# Altium footprint library PCB4_PcbLib.PcbLib: 18 footprints (part 1 of 2)
Each footprint in its own frame and in the unit in brackets; x right, y up, seen from the top. Pads: shape width x height; smd on the part's side, far side on the other; paste and mask are expansions set on the pad; w line width, h text height; cw(c..) or ccw(c..) is an arc to the next point about the centre after c.
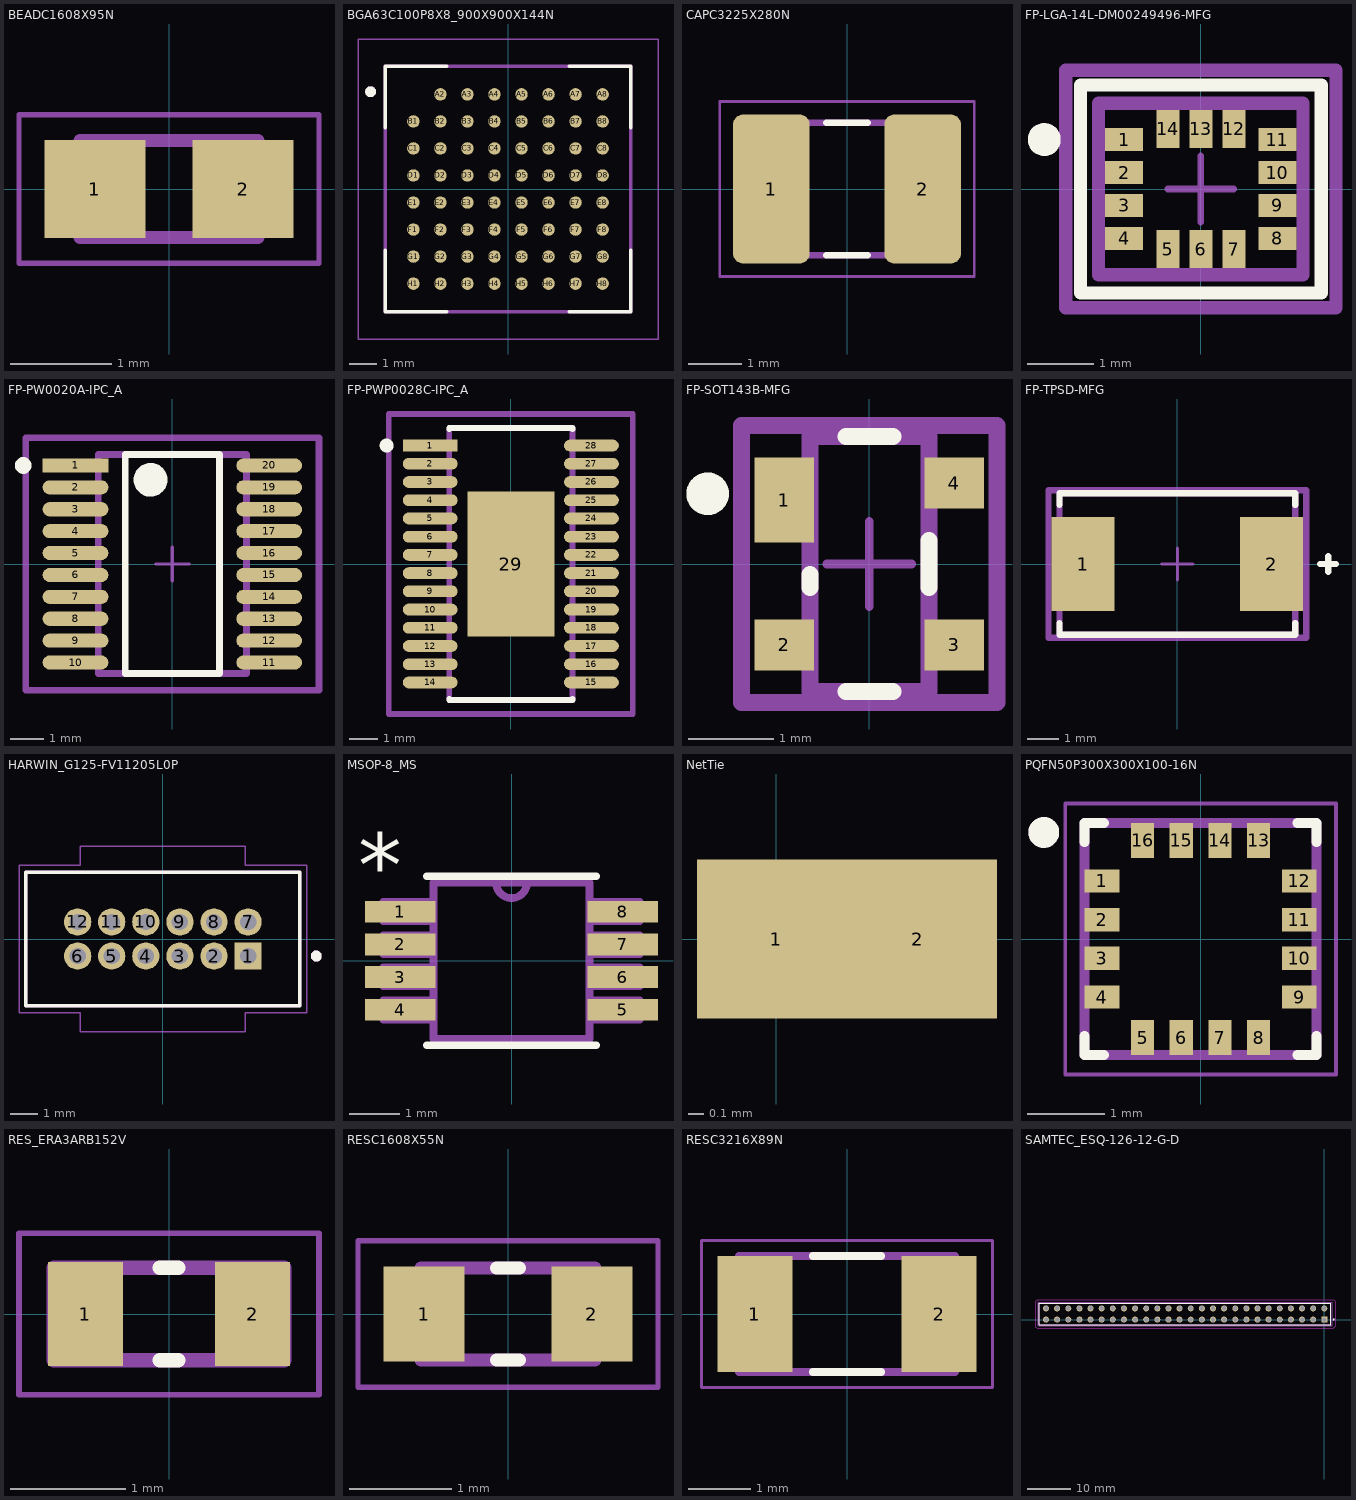
[diagram p0: the footprints below, top view; thin cyan lines are the x and y axes]

## BEADC1608X95N [mm]
pads (2):
  rect 1x0.97 smd: 1(-0.735,0) 2(0.735,0)
Mechanical 13:
  lines w0.127: -0.88,-0.48 -0.88,0.48 0.88,0.48 0.88,-0.48 -0.88,-0.48
Mechanical 15:
  lines w0.05: -1.485,-0.735 -1.485,0.735 1.485,0.735 1.485,-0.735 -1.485,-0.735

## BGA63C100P8X8_900X900X144N [mm]
pads (63):
  round 0.46 smd paste+0 mask+0.102: A2(-2.5,3.5) A3(-1.5,3.5) A4(-0.5,3.5) A5(0.5,3.5) A6(1.5,3.5) A7(2.5,3.5) A8(3.5,3.5) B1(-3.5,2.5) B2(-2.5,2.5) B3(-1.5,2.5) B4(-0.5,2.5) B5(0.5,2.5) B6(1.5,2.5) B7(2.5,2.5) B8(3.5,2.5) C1(-3.5,1.5) C2(-2.5,1.5) C3(-1.5,1.5) C4(-0.5,1.5) C5(0.5,1.5) C6(1.5,1.5) C7(2.5,1.5) C8(3.5,1.5) D1(-3.5,0.5) D2(-2.5,0.5) D3(-1.5,0.5) D4(-0.5,0.5) D5(0.5,0.5) D6(1.5,0.5) D7(2.5,0.5) D8(3.5,0.5) E1(-3.5,-0.5) E2(-2.5,-0.5) E3(-1.5,-0.5) E4(-0.5,-0.5) E5(0.5,-0.5) E6(1.5,-0.5) E7(2.5,-0.5) E8(3.5,-0.5) F1(-3.5,-1.5) F2(-2.5,-1.5) F3(-1.5,-1.5) F4(-0.5,-1.5) F5(0.5,-1.5) F6(1.5,-1.5) F7(2.5,-1.5) F8(3.5,-1.5) G1(-3.5,-2.5) G2(-2.5,-2.5) G3(-1.5,-2.5) G4(-0.5,-2.5) G5(0.5,-2.5) G6(1.5,-2.5) G7(2.5,-2.5) G8(3.5,-2.5) H1(-3.5,-3.5) H2(-2.5,-3.5) H3(-1.5,-3.5) H4(-0.5,-3.5) H5(0.5,-3.5) H6(1.5,-3.5) H7(2.5,-3.5) H8(3.5,-3.5)
Top Overlay:
  circle w0.2: c-5.084,3.6 r0.1
  lines w0.127: -4.54,-2.27 -4.54,-4.54 -2.27,-4.54 ; -4.54,2.27 -4.54,4.54 -2.27,4.54 ; 2.27,-4.54 4.54,-4.54 4.54,-2.27 ; 2.27,4.54 4.54,4.54 4.54,2.27
Mechanical 13:
  circle w0.2: c-5.084,3.6 r0.1
  lines w0.127: -4.54,-4.54 4.54,-4.54 4.54,4.54 -4.54,4.54 -4.54,-4.54
Mechanical 15:
  lines w0.05: -5.55,-5.55 5.55,-5.55 5.55,5.55 -5.55,5.55 -5.55,-5.55
3D body "AR0135CS2C00SUEA0-DRBR1.STEP": height 1, standoff 0, extent -4.54,-4.54 4.54,4.54

## CAPC3225X280N [mm]
pads (2):
  rrect25% 1.45x2.81 smd paste+0 mask+0.102: 1(-1.43,0) 2(1.43,0)
Top Overlay:
  lines w0.127: -0.39,-1.25 0.39,-1.25 ; -0.39,1.25 0.39,1.25
Mechanical 13:
  lines w0.127: -1.6,-1.25 -1.6,1.25 1.6,1.25 1.6,-1.25 -1.6,-1.25
Mechanical 15:
  lines w0.05: -2.405,-1.655 -2.405,1.655 2.405,1.655 2.405,-1.655 -2.405,-1.655
3D body "step_temp.STEP": height 2.8, standoff 0, extent -1.6,-1.25 1.6,1.25

## FP-LGA-14L-DM00249496-MFG [mm]
pads (14):
  rect 0.575x0.35 smd paste+0 mask+0.05: 1(-1.162,0.75) 2(-1.162,0.25) 3(-1.162,-0.25) 4(-1.162,-0.75) 8(1.162,-0.75) 9(1.162,-0.25) 10(1.162,0.25) 11(1.162,0.75)
  rect 0.35x0.575 smd paste+0 mask+0.05: 5(-0.5,-0.913) 6(0,-0.913) 7(0.5,-0.913) 12(0.5,0.913) 13(0,0.913) 14(-0.5,0.913)
Top Overlay:
  circle w0.25: c-2.375,0.75 r0.125
  lines w0.2: -1.825,-1.575 -1.825,1.575 1.825,1.575 1.825,-1.575 -1.825,-1.575
Top 3D Body:
  lines w0.2: -1.55,-1.3 -1.55,1.3 1.55,1.3 1.55,-1.3 -1.55,-1.3
Top Courtyard:
  lines w0.2: -2.05,-1.8 -2.05,1.8 2.05,1.8 2.05,-1.8 -2.05,-1.8
Top Assembly:
  lines w0.2: -2.05,-1.8 -2.05,1.8 2.05,1.8 2.05,-1.8 -2.05,-1.8
  text ".Designator" at 0,0.188 h1
Top Component Center:
  lines w0.1: -0.5,0 0.5,0 ; 0,-0.5 0,0.5
3D body "IC_STMicroelectronics_LSM6DSOXTR_eec.STEP": height 0.25, standoff 0, extent -2.05,-1.8 2.05,1.8

## FP-PW0020A-IPC_A [mm]
pads (20):
  rect 1.955x0.421 smd paste+0 mask+0: 1(-2.875,2.925)
  rrect100% 1.955x0.421 smd paste+0 mask+0: 2(-2.875,2.275) 3(-2.875,1.625) 4(-2.875,0.975) 5(-2.875,0.325) 6(-2.875,-0.325) 7(-2.875,-0.975) 8(-2.875,-1.625) 9(-2.875,-2.275) 10(-2.875,-2.925) 11(2.875,-2.925) 12(2.875,-2.275) 13(2.875,-1.625) 14(2.875,-0.975) 15(2.875,-0.325) 16(2.875,0.325) 17(2.875,0.975) 18(2.875,1.625) 19(2.875,2.275) 20(2.875,2.925)
Top Overlay:
  circle w0.5: c-0.648,2.5 r0.25
  circle w0.25: c-4.428,2.925 r0.125
  lines w0.2: -1.398,-3.25 1.398,-3.25 1.398,3.25 -1.398,3.25 -1.398,-3.25
Top 3D Body:
  lines w0.2: -2.2,-3.25 2.2,-3.25 2.2,3.25 -2.2,3.25 -2.2,-3.25
Top Courtyard:
  lines w0.2: -4.353,-3.75 4.353,-3.75 4.353,3.75 -4.353,3.75 -4.353,-3.75
Top Assembly:
  lines w0.2: -4.353,-3.75 4.353,-3.75 4.353,3.75 -4.353,3.75 -4.353,-3.75
  text ".Designator" at 0,0.188 h1
Top Component Center:
  lines w0.1: -0.5,0 0.5,0 ; 0,-0.5 0,0.5
3D body "IC_Texas_Instruments_CDCE906PW_eec.STEP": height 0.25, standoff 0, extent -4.353,-3.75 4.353,3.75

## FP-PWP0028C-IPC_A [mm]
pads (29):
  rect 1.955x0.421 smd paste+0 mask+0: 1(-2.875,4.225)
  rrect100% 1.955x0.421 smd paste+0 mask+0: 2(-2.875,3.575) 3(-2.875,2.925) 4(-2.875,2.275) 5(-2.875,1.625) 6(-2.875,0.975) 7(-2.875,0.325) 8(-2.875,-0.325) 9(-2.875,-0.975) 10(-2.875,-1.625) 11(-2.875,-2.275) 12(-2.875,-2.925) 13(-2.875,-3.575) 14(-2.875,-4.225) 15(2.875,-4.225) 16(2.875,-3.575) 17(2.875,-2.925) 18(2.875,-2.275) 19(2.875,-1.625) 20(2.875,-0.975) 21(2.875,-0.325) 22(2.875,0.325) 23(2.875,0.975) 24(2.875,1.625) 25(2.875,2.275) 26(2.875,2.925) 27(2.875,3.575) 28(2.875,4.225)
  rect 3.1x5.18 smd paste-1000 mask+0: 29(0,0)
Top Overlay:
  circle w0.25: c-4.428,4.225 r0.125
  lines w0.2: -2.2,-4.81 -2.2,-4.85 2.2,-4.85 2.2,-4.81 ; -2.2,4.81 -2.2,4.85 2.2,4.85 2.2,4.81
Top Paste:
  rectangle: -1.033,-2.073 1.033,-0.258
  rectangle: -1.033,0.258 1.033,2.073
Top 3D Body:
  lines w0.2: -2.2,-4.85 -2.2,4.85 2.2,4.85 2.2,-4.85 -2.2,-4.85
Top Courtyard:
  lines w0.2: -4.353,-5.35 -4.353,5.35 4.353,5.35 4.353,-5.35 -4.353,-5.35
Top Assembly:
  lines w0.2: -4.353,-5.35 -4.353,5.35 4.353,5.35 4.353,-5.35 -4.353,-5.35
  text ".Designator" at 0,0.188 h1
Top Component Center:
  lines w0.1: -0.5,0 0.5,0 ; 0,-0.5 0,0.5
3D body "IC_Texas_Instruments_DRV8880PWPR_eec.STEP": height 0.25, standoff 0, extent -4.353,-5.35 4.353,5.35

## FP-SOT143B-MFG [mm]
pads (4):
  rect 0.7x1 smd paste-1000 mask+0: 1(-1,0.75)
  rect 0.7x0.6 smd paste-1000 mask+0: 2(-1,-0.95) 3(1,-0.95) 4(1,0.95)
Top Overlay:
  circle w0.25: c-1.9,0.825 r0.125
  lines w0.2: -0.7,-0.275 -0.7,-0.125 ; -0.275,-1.5 0.275,-1.5 ; -0.275,1.5 0.275,1.5 ; 0.7,-0.275 0.7,0.275
Top Paste:
  rectangle: -1.3,0.3 -0.7,1.2
  rectangle: -1.3,-1.2 -0.7,-0.7
  rectangle: 0.7,-1.2 1.3,-0.7
  rectangle: 0.7,0.7 1.3,1.2
Top 3D Body:
  lines w0.2: -0.7,-1.5 0.7,-1.5 0.7,1.5 -0.7,1.5 -0.7,-1.5
Top Courtyard:
  lines w0.2: -1.5,-1.625 1.5,-1.625 1.5,1.625 -1.5,1.625 -1.5,-1.625
Top Assembly:
  lines w0.2: -1.5,-1.625 1.5,-1.625 1.5,1.625 -1.5,1.625 -1.5,-1.625
  text ".Designator" at 0,0.188 h1
Top Component Center:
  lines w0.1: -0.5,0 0.5,0 ; 0,-0.5 0,0.5
3D body "Trans_Nexperia_BCM62B_215_eec.STEP": height 0.25, standoff 0, extent -1.5,-1.625 1.5,1.625

## FP-TPSD-MFG [mm]
pads (2):
  rect 2x3 smd paste+0 mask+0: 1(-3,0) 2(3,0)
Top Overlay:
  lines w0.2: -3.75,-1.875 -3.75,-2.25 3.75,-2.25 3.75,-1.875 ; -3.75,1.875 -3.75,2.25 3.75,2.25 3.75,1.875 ; 4.55,0 5.05,0 ; 4.8,-0.25 4.8,0.25
Top 3D Body:
  lines w0.2: -3.75,-2.25 -3.75,2.25 3.75,2.25 3.75,-2.25 -3.75,-2.25
Top Courtyard:
  lines w0.2: -4.1,-2.35 -4.1,2.35 4.1,2.35 4.1,-2.35 -4.1,-2.35
Top Assembly:
  lines w0.2: -4.1,-2.35 -4.1,2.35 4.1,2.35 4.1,-2.35 -4.1,-2.35
  text ".Designator" at 0,0 h1
Top Component Center:
  lines w0.1: -0.5,0 0.5,0 ; 0,-0.5 0,0.5
3D body "Cap_AVX_TPSD476K016R0150_eec.STEP": height 0.25, standoff 0, extent -4.1,-2.35 4.1,2.35

## HARWIN_G125-FV11205L0P [mm]
pads (12):
  rect 1x1 / inner round 1 / far side rect 1x1 hole 0.6: 1(3.125,-0.625)
  round 1 hole 0.6: 2(1.875,-0.625) 3(0.625,-0.625) 4(-0.625,-0.625) 5(-1.875,-0.625) 6(-3.125,-0.625) 7(3.125,0.625) 8(1.875,0.625) 9(0.625,0.625) 10(-0.625,0.625) 11(-1.875,0.625) 12(-3.125,0.625)
Top Overlay:
  circle w0.2: c5.625,-0.625 r0.1
  lines w0.127: -5.025,-2.45 5.025,-2.45 5.025,2.45 -5.025,2.45 -5.025,-2.45
Mechanical 13:
  circle w0.2: c5.625,-0.625 r0.1
  lines w0.127: -5.025,-2.45 5.025,-2.45 5.025,2.45 -5.025,2.45 -5.025,-2.45
Mechanical 15:
  lines w0.05: -5.275,-2.7 -5.275,2.7 -3.025,2.7 -3.025,3.4 3.025,3.4 3.025,2.7 5.275,2.7 5.275,-2.7 3.025,-2.7 3.025,-3.4 -3.025,-3.4 -3.025,-2.7 -5.275,-2.7

## MSOP-8_MS [mil]
pads (8):
  rect 55x17 smd: 1(-87,38.39) 2(-87,12.8) 3(-87,-12.8) 4(-87,-38.39) 5(87,-38.39) 6(87,-12.8) 7(87,12.8) 8(87,38.39)
Top Overlay:
  lines w6: -66,-66 66,-66 ; -66,66 66,66
  text "*" at -120,50 h50
Mechanical 13:
  lines w6: -12,61 ccw(c0,61) 12,61 ; -12,61 -61,61 -61,-61 61,-61 61,61 12,61 ; -12,61 12,61 ; -100,-46 -61,-46 -61,-31 -100,-31 -100,-46 ; -100,-20 -61,-20 -61,-5 -100,-5 -100,-20 ; -100,5 -61,5 -61,20 -100,20 -100,5 ; -100,31 -61,31 -61,46 -100,46 -100,31 ; 61,-46 100,-46 100,-31 61,-31 61,-46 ; 61,-20 100,-20 100,-5 61,-5 61,-20 ; 61,5 100,5 100,20 61,20 61,5 ; 61,31 100,31 100,46 61,46 61,31
  text "*" at -69,8 h50

## NetTie [mm]
pads (2):
  rect 1x1 smd: 1(0,0) 2(0.889,0)

## PQFN50P300X300X100-16N [mm]
pads (16):
  rect 0.45x0.3 smd: 1(-1.275,0.75) 2(-1.275,0.25) 3(-1.275,-0.25) 4(-1.275,-0.75) 9(1.275,-0.75) 10(1.275,-0.25) 11(1.275,0.25) 12(1.275,0.75)
  rect 0.3x0.45 smd: 5(-0.75,-1.275) 6(-0.25,-1.275) 7(0.25,-1.275) 8(0.75,-1.275) 13(0.75,1.275) 14(0.25,1.275) 15(-0.25,1.275) 16(-0.75,1.275)
Top Overlay:
  circle w0.2: c-2.028,1.378 r0.1
  lines w0.127: -1.5,-1.25 -1.5,-1.5 -1.25,-1.5 ; -1.5,1.25 -1.5,1.5 -1.25,1.5 ; 1.25,-1.5 1.5,-1.5 1.5,-1.25 ; 1.25,1.5 1.5,1.5 1.5,1.25
Mechanical 13:
  circle w0.2: c-2.028,1.378 r0.1
  lines w0.127: -1.5,-1.5 -1.5,1.5 1.5,1.5 1.5,-1.5 -1.5,-1.5
Mechanical 15:
  lines w0.05: -1.75,-1.75 -1.75,1.75 1.75,1.75 1.75,-1.75 -1.75,-1.75
3D body "step_temp.STEP": height 1, standoff 0, extent -1.5,-1.5 1.5,1.5

## RES_ERA3ARB152V [mm]
height 0.45
pads (2):
  rect 0.65x0.9 smd: 1(-0.725,0) 2(0.725,0)
Top Overlay:
  lines w0.127: -0.08,-0.4 0.08,-0.4 ; -0.08,0.4 0.08,0.4
Mechanical 13:
  lines w0.127: -1,-0.4 -1,0.4 1,0.4 1,-0.4 -1,-0.4
Mechanical 15:
  lines w0.05: -1.3,-0.7 -1.3,0.7 1.3,0.7 1.3,-0.7 -1.3,-0.7
3D body "step_temp.STEP": height 0.45, standoff 0, extent -0.8,-0.4 0.8,0.4

## RESC1608X55N [mm]
pads (2):
  rect 0.79x0.93 smd paste+0 mask+0.102: 1(-0.82,0) 2(0.82,0)
Top Overlay:
  lines w0.127: -0.11,-0.45 0.11,-0.45 ; -0.11,0.45 0.11,0.45
Mechanical 13:
  lines w0.127: -0.85,-0.45 -0.85,0.45 0.85,0.45 0.85,-0.45 -0.85,-0.45
Mechanical 15:
  lines w0.05: -1.465,-0.715 -1.465,0.715 1.465,0.715 1.465,-0.715 -1.465,-0.715
3D body "step_temp.STEP": height 0.55, standoff 0, extent -0.8,-0.4 0.8,0.4

## RESC3216X89N [mm]
pads (2):
  rect 1.21x1.86 smd paste+0 mask+0.102: 1(-1.476,0) 2(1.476,0)
Top Overlay:
  lines w0.127: -0.55,-0.93 0.55,-0.93 ; -0.55,0.93 0.55,0.93
Mechanical 13:
  lines w0.127: -1.73,-0.93 1.73,-0.93 1.73,0.93 -1.73,0.93 -1.73,-0.93
Mechanical 15:
  lines w0.05: -2.331,-1.181 2.331,-1.181 2.331,1.181 -2.331,1.181 -2.331,-1.181
3D body "step_temp.STEP": height 0.89, standoff 0, extent -1.6,-0.8 1.6,0.8

## SAMTEC_ESQ-126-12-G-D [mm]
pads (52):
  rect 1.37x1.37 hole 1.02: 01(0,0)
  round 1.37 hole 1.02: 02(0,2.54) 03(-2.54,0) 04(-2.54,2.54) 05(-5.08,0) 06(-5.08,2.54) 07(-7.62,0) 08(-7.62,2.54) 09(-10.16,0) 10(-10.16,2.54) 11(-12.7,0) 12(-12.7,2.54) 13(-15.24,0) 14(-15.24,2.54) 15(-17.78,0) 16(-17.78,2.54) 17(-20.32,0) 18(-20.32,2.54) 19(-22.86,0) 20(-22.86,2.54) 21(-25.4,0) 22(-25.4,2.54) 23(-27.94,0) 24(-27.94,2.54) 25(-30.48,0) 26(-30.48,2.54) 27(-33.02,0) 28(-33.02,2.54) 29(-35.56,0) 30(-35.56,2.54) 31(-38.1,0) 32(-38.1,2.54) 33(-40.64,0) 34(-40.64,2.54) 35(-43.18,0) 36(-43.18,2.54) 37(-45.72,0) 38(-45.72,2.54) 39(-48.26,0) 40(-48.26,2.54) 41(-50.8,0) 42(-50.8,2.54) 43(-53.34,0) 44(-53.34,2.54) 45(-55.88,0) 46(-55.88,2.54) 47(-58.42,0) 48(-58.42,2.54) 49(-60.96,0) 50(-60.96,2.54) 51(-63.5,0) 52(-63.5,2.54)
Top Overlay:
  circle w0.2: c2.175,0 r0.1
  lines w0.2: -65.025,-1.205 1.525,-1.205 1.525,3.745 -65.025,3.745 -65.025,-1.205
Keep-Out Layer:
  lines w0.254: -65.786,-1.778 -65.786,4.191 -65.405,4.572 2.159,4.572 2.667,4.064 2.667,-1.397 2.032,-2.032 -62.992,-2.032 -65.532,-2.032 -65.786,-1.778
Mechanical 13:
  circle w0.2: c2.175,0 r0.1
  lines w0.1: -65.025,-1.205 -65.025,3.745 ; -65.025,-1.205 1.525,-1.205 ; -65.025,-1.205 -65.025,3.745 ; -65.025,3.745 1.525,3.745 ; -65.025,3.745 1.525,3.745 ; 1.525,-1.205 1.525,3.745 ; 1.525,-1.205 1.525,3.745
Mechanical 15:
  lines w0.05: -65.275,-1.455 1.775,-1.455 1.775,3.995 -65.275,3.995 -65.275,-1.455